# EAGLE library part IC20 (library ics)
Generic integrated circuit, 20 pins
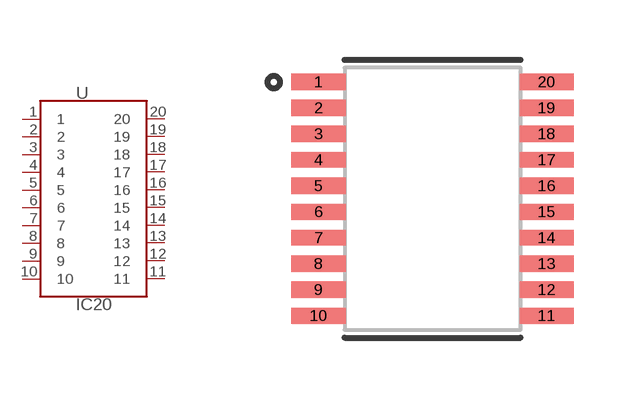
[diagram p3: symbol with the pads of TSSOP-20; footprint TSSOP-20]

Designator prefix U

## IC20TSSOP  [TSSOP-20]
1  1  pas
2  2  pas
3  3  pas
4  4  pas
5  5  pas
6  6  pas
7  7  pas
8  8  pas
9  9  pas
10  10  pas
11  11  pas
12  12  pas
13  13  pas
14  14  pas
15  15  pas
16  16  pas
17  17  pas
18  18  pas
19  19  pas
20  20  pas

## Footprint TSSOP-20 (pad centres in mm)
Thin shrink small outline package, 20 pins, pitch 0.65 mm, body 4.4 mm. Sizes: JEDEC MO-153 nominal sizes; pads worked out for this kit. Not verified against a datasheet.
smd 1.35 x 0.4: 1 -2.85,2.925; 2 -2.85,2.275; 3 -2.85,1.625; 4 -2.85,0.975; 5 -2.85,0.325; 6 -2.85,-0.325; 7 -2.85,-0.975; 8 -2.85,-1.625; 9 -2.85,-2.275; 10 -2.85,-2.925; 11 2.85,-2.925; 12 2.85,-2.275; 13 2.85,-1.625; 14 2.85,-0.975; 15 2.85,-0.325; 16 2.85,0.325; 17 2.85,0.975; 18 2.85,1.625; 19 2.85,2.275; 20 2.85,2.925